# Altium footprint library A7670C_LASE.PcbLib: 1 footprints
Each footprint in its own frame and in the unit in brackets; x right, y up, seen from the top. Pads: shape width x height; smd on the part's side, far side on the other; paste and mask are expansions set on the pad; w line width, h text height; cw(c..) or ccw(c..) is an arc to the next point about the centre after c.
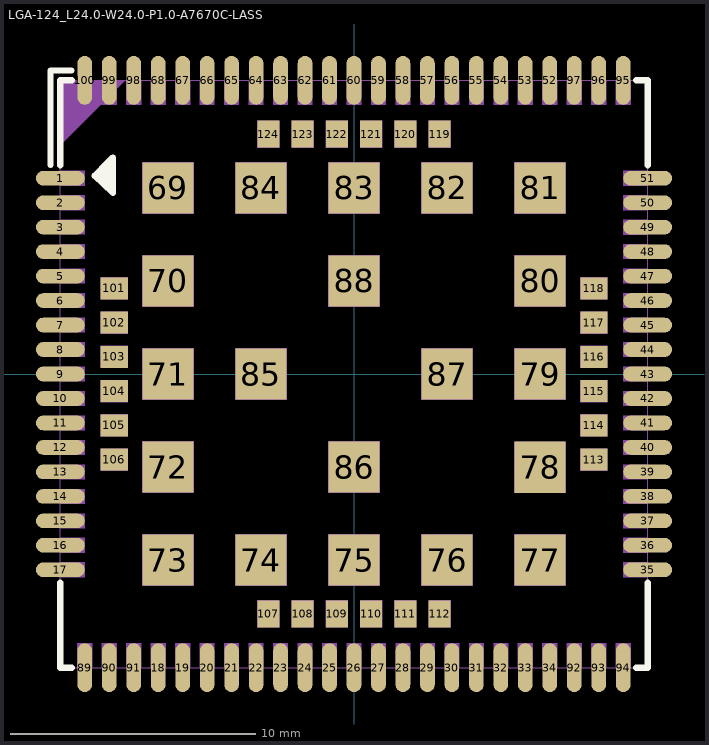
[diagram p0: the footprint, top view; thin cyan lines are the x and y axes]

## LGA-124_L24.0-W24.0-P1.0-A7670C-LASS [mm]
pads (124):
  oval 2x0.6 smd paste-100 mask+0.05: 1(-12,8) 2(-12,7) 3(-12,6) 4(-12,5) 5(-12,4) 6(-12,3) 7(-12,2) 8(-12,1) 9(-12,0) 10(-12,-1) 11(-12,-2) 12(-12,-3) 13(-12,-4) 14(-12,-5) 15(-12,-6) 16(-12,-7) 17(-12,-8) 35(12,-8) 36(12,-7) 37(12,-6) 38(12,-5) 39(12,-4) 40(12,-3) 41(12,-2) 42(12,-1) 43(12,0) 44(12,1) 45(12,2) 46(12,3) 47(12,4) 48(12,5) 49(12,6) 50(12,7) 51(12,8)
  oval 0.6x2 smd paste-100 mask+0.05: 18(-8,-12) 19(-7,-12) 20(-6,-12) 21(-5,-12) 22(-4,-12) 23(-3,-12) 24(-2,-12) 25(-1,-12) 26(0,-12) 27(1,-12) 28(2,-12) 29(3,-12) 30(4,-12) 31(5,-12) 32(6,-12) 33(7,-12) 34(8,-12) 52(8,12) 53(7,12) 54(6,12) 55(5,12) 56(4,12) 57(3,12) 58(2,12) 59(1,12) 60(0,12) 61(-1,12) 62(-2,12) 63(-3,12) 64(-4,12) 65(-5,12) 66(-6,12) 67(-7,12) 68(-8,12) 89(-11,-12) 90(-10,-12) 91(-9,-12) 92(9,-12) 93(10,-12) 94(11,-12) 95(11,12) 96(10,12) 97(9,12) 98(-9,12) 99(-10,12) 100(-11,12)
  rect 2.1x2.1 smd paste-100 mask+0.05: 69(-7.6,7.6) 70(-7.6,3.8) 71(-7.6,0) 72(-7.6,-3.8) 73(-7.6,-7.6) 74(-3.8,-7.6) 75(0,-7.6) 76(3.8,-7.6) 77(7.6,-7.6) 78(7.6,-3.81) 79(7.6,0) 80(7.6,3.8) 81(7.6,7.6) 82(3.8,7.6) 83(0,7.6) 84(-3.8,7.6) 85(-3.8,0) 86(0,-3.8) 87(3.8,0) 88(0,3.8)
  rect 1.12x0.9 smd paste-100 mask+0.05: 101(-9.8,3.5) 102(-9.8,2.1) 103(-9.8,0.7) 104(-9.8,-0.7) 105(-9.8,-2.1) 106(-9.8,-3.5)
  rect 0.9x1.1 smd paste-100 mask+0.05: 107(-3.5,-9.8) 108(-2.1,-9.8) 109(-0.7,-9.8) 110(0.7,-9.8) 111(2.1,-9.8) 112(3.5,-9.8) 119(3.5,9.8) 120(2.1,9.8) 121(0.7,9.8) 122(-0.7,9.8) 123(-2.1,9.8) 124(-3.5,9.8)
  rect 1.1x0.9 smd paste-100 mask+0.05: 113(9.8,-3.5) 114(9.8,-2.1) 115(9.8,-0.7) 116(9.8,0.7) 117(9.8,2.1) 118(9.8,3.5)
Top Overlay:
  region: -9.85,8.85 -9.85,7.55 -10.049,7.55 -10.599,8.1
  lines w0.254: -12.4,8.55 -12.4,12.4 -11.549,12.4 ; -12,-8.531 -12,-12 -11.531,-12 ; -12,8.531 -12,12 -11.531,12 ; 11.531,-12 12,-12 12,-8.531 ; 11.531,12 12,12 12,8.531 ; -10.599,8.1 -10.051,8.649 -9.85,8.85 -9.85,7.4 -10.6,8.1
Top Paste:
  drawing of 124 lines, arcs and shapes, not listed
Mechanical 2:
  region: -12,12 -9.35,12 -12,9.35
Mechanical 6:
  lines w0.051: -12,-12 12,-12 12,12 -12,12 -12,-12
Mechanical 8:
  region: -11.94,12 -11.94,11.975 -11.975,11.94 -12.025,11.94 -12.06,11.975 -12.06,12 -12.06,12.025 -12.025,12.06 -11.975,12.06 -11.94,12.025 -11.94,12
Mechanical 9:
  drawing of 124 lines, arcs and shapes, not listed